# EAGLE library part IC_UC_ATMEGA32U4-QFN44 (library dp_devices.v6)
ATMEGA32U4 QFN-44
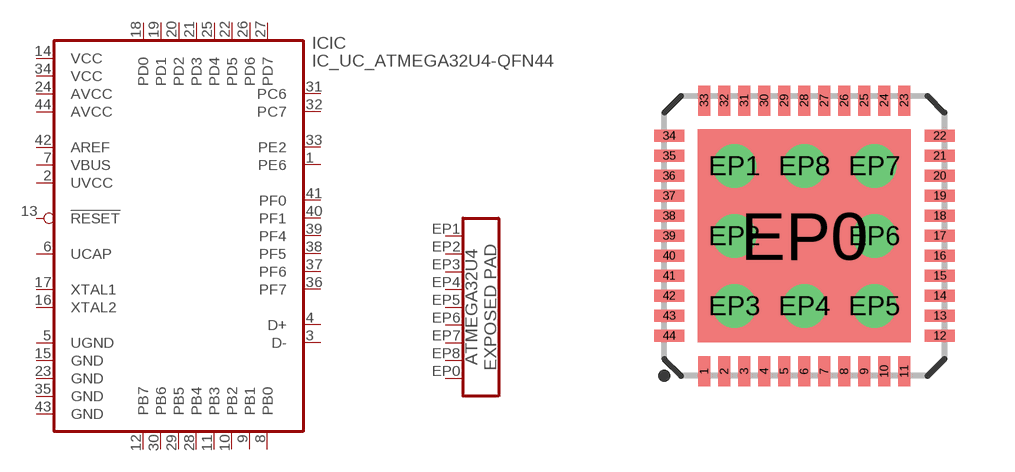
[diagram p150: symbol with the pads of QFN44_7X7; footprint QFN44_7X7]

Designator prefix IC; gates IC=ATMEGA32U4 EXPOSED_PAD=ATMEGA32U34_QFN_EXPOSED_PAD

## IC_UC_ATMEGA32U4-QFN44  [QFN44_7X7]
1  IC:PE6
2  IC:UVCC  pwr
3  IC:D-
4  IC:D+
5  IC:UGND  pwr
6  IC:UCAP  pwr
7  IC:VBUS  pwr
8  IC:PB0
9  IC:PB1
10  IC:PB2
11  IC:PB3
12  IC:PB7
13  IC:!RESET  in
14  IC:VCC  pwr
15  IC:GND  pwr
16  IC:XTAL2
17  IC:XTAL1
18  IC:PD0
19  IC:PD1
20  IC:PD2
21  IC:PD3
22  IC:PD5
23  IC:GND  pwr
24  IC:AVCC  pwr
25  IC:PD4
26  IC:PD6
27  IC:PD7
28  IC:PB4
29  IC:PB5
30  IC:PB6
31  IC:PC6
32  IC:PC7
33  IC:PE2
34  IC:VCC  pwr
35  IC:GND  pwr
36  IC:PF7
37  IC:PF6
38  IC:PF5
39  IC:PF4
40  IC:PF1
41  IC:PF0
42  IC:AREF  pwr
43  IC:GND  pwr
44  IC:AVCC  pwr
EP0  EXPOSED_PAD:EXPOSED_PAD  pwr
EP1  EXPOSED_PAD:GND_VIA  pwr
EP2  EXPOSED_PAD:GND_VIA  pwr
EP3  EXPOSED_PAD:GND_VIA  pwr
EP4  EXPOSED_PAD:GND_VIA  pwr
EP5  EXPOSED_PAD:GND_VIA  pwr
EP6  EXPOSED_PAD:GND_VIA  pwr
EP7  EXPOSED_PAD:GND_VIA  pwr
EP8  EXPOSED_PAD:GND_VIA  pwr

## Footprint QFN44_7X7 (pad centres in mm)
QFN-44 0.50 pitch
smd 0.3 x 0.75: 1 -2.5,-3.385; 2 -2,-3.385; 3 -1.5,-3.385; 4 -1,-3.385; 5 -0.5,-3.385; 6 0,-3.385; 7 0.5,-3.385; 8 1,-3.385; 9 1.5,-3.385; 10 2,-3.385; 11 2.5,-3.385; 23 2.5,3.385; 24 2,3.385; 25 1.5,3.385; 26 1,3.385; 27 0.5,3.385; 28 0,3.385; 29 -0.5,3.385; 30 -1,3.385; 31 -1.5,3.385; 32 -2,3.385; 33 -2.5,3.385
smd 0.75 x 0.3: 12 3.385,-2.5; 13 3.385,-2; 14 3.385,-1.5; 15 3.385,-1; 16 3.385,-0.5; 17 3.385,0; 18 3.385,0.5; 19 3.385,1; 20 3.385,1.5; 21 3.385,2; 22 3.385,2.5; 34 -3.385,2.5; 35 -3.385,2; 36 -3.385,1.5; 37 -3.385,1; 38 -3.385,0.5; 39 -3.385,0; 40 -3.385,-0.5; 41 -3.385,-1; 42 -3.385,-1.5; 43 -3.385,-2; 44 -3.385,-2.5
smd 5.32 x 5.32: EP0 0,0
drill 0.584: EP1 -1.75,1.75; EP2 -1.75,0; EP3 -1.75,-1.75; EP4 0,-1.75; EP5 1.75,-1.75; EP6 1.75,0; EP7 1.75,1.75; EP8 0,1.75